# Altium footprint library FootPrintLib_8.PcbLib: 590 footprints (part 20 of 37)
Each footprint in its own frame and in the unit in brackets; x right, y up, seen from the top. Pads: shape width x height; smd on the part's side, far side on the other; paste and mask are expansions set on the pad; w line width, h text height; cw(c..) or ccw(c..) is an arc to the next point about the centre after c.
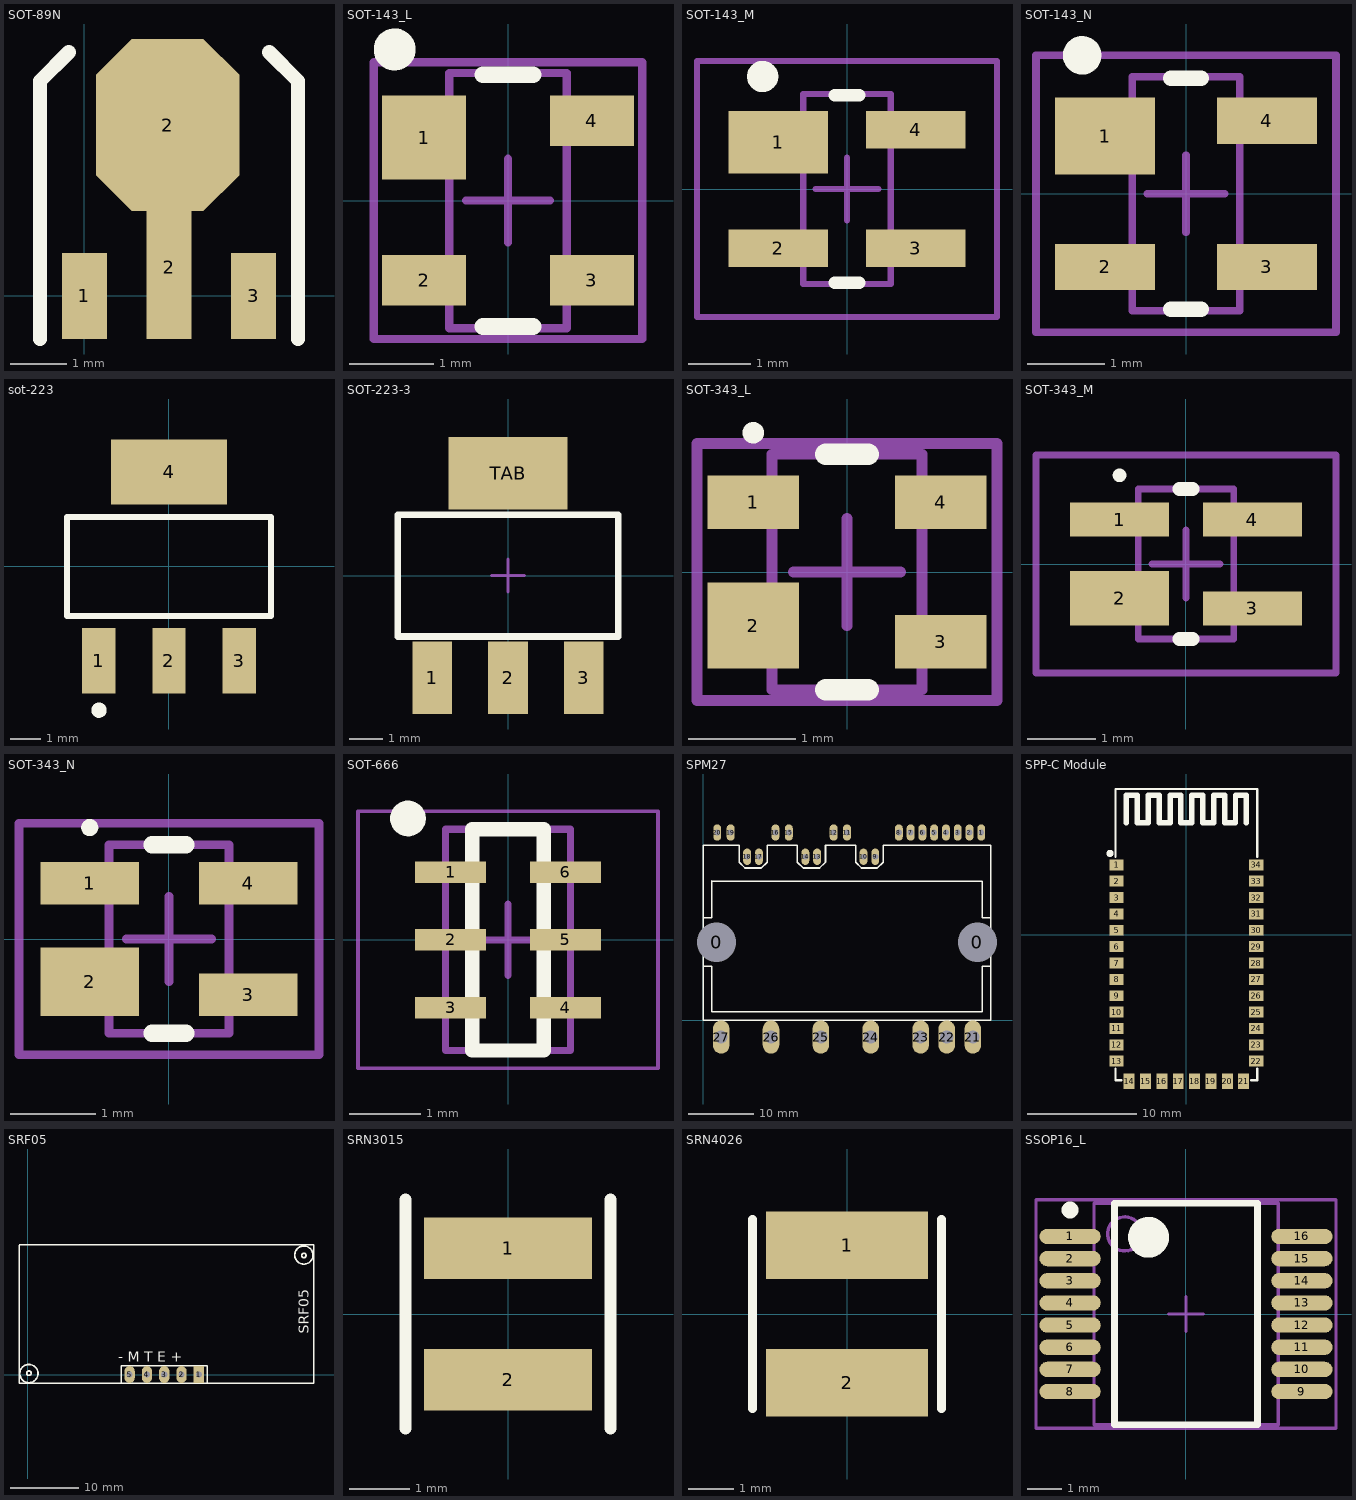
[diagram p19: the footprints below, top view; thin cyan lines are the x and y axes]

## SOT-89N [mm]
pads (4):
  rect 0.8x1.524 smd: 1(0,0) 3(3,0)
  oct 2.54x3.048 smd: 2(1.476,3.029)
  rect 0.8x2.54 smd: 2(1.5,0.508)
Top Overlay:
  lines w0.254: -0.786,-0.762 -0.786,3.81 -0.278,4.318 ; 3.278,4.318 3.786,3.81 3.786,-0.762

## SOT-143_L [mm] "SOT143, 4-Leads, Body 2.9x1.3mm, Pitch 1.9mm, Lead Span 2.5mm, IPC High Density"
height 1.1
pads (4):
  rect 1x1 smd: 1(-1,0.75)
  rect 1x0.6 smd: 2(-1,-0.95) 3(1,-0.95) 4(1,0.95)
Top Overlay:
  circle w0.25: c-1.35,1.8 r0.125
  lines w0.2: -0.3,-1.5 0.3,-1.5 ; -0.3,1.5 0.3,1.5
Mechanical 13:
  lines w0.1: -0.7,-1.52 0.7,-1.52 0.7,1.52 -0.7,1.52 -0.7,-1.52
Mechanical 15:
  lines w0.1: -0.5,0 0.5,0 ; 0,-0.5 0,0.5 ; -1.6,-1.65 1.6,-1.65 1.6,1.65 -1.6,1.65 -1.6,-1.65
3D body: height 1.1, standoff 0, extent -0.7,-1.52 0.7,1.52

## SOT-143_M [mm] "SOT143, 4-Leads, Body 2.9x1.3mm, Pitch 1.9mm, Lead Span 2.5mm, IPC Low Density"
height 1.1
pads (4):
  rect 1.6x1 smd: 1(-1.1,0.75)
  rect 1.6x0.6 smd: 2(-1.1,-0.95) 3(1.1,-0.95) 4(1.1,0.95)
Top Overlay:
  circle w0.25: c-1.35,1.8 r0.125
  lines w0.2: -0.2,-1.5 0.2,-1.5 ; -0.2,1.5 0.2,1.5
Mechanical 13:
  lines w0.1: -0.7,-1.52 -0.7,1.52 0.7,1.52 0.7,-1.52 -0.7,-1.52
Mechanical 15:
  lines w0.1: -0.5,0 0.5,0 ; 0,-0.5 0,0.5 ; -2.4,-2.05 -2.4,2.05 2.4,2.05 2.4,-2.05 -2.4,-2.05
3D body: height 1.1, standoff 0, extent -0.7,-1.52 0.7,1.52

## SOT-143_N [mm] "SOT143, 4-Leads, Body 2.9x1.3mm, Pitch 1.9mm, Lead Span 2.5mm, IPC Medium Density"
height 1.1
pads (4):
  rect 1.3x1 smd: 1(-1.05,0.75)
  rect 1.3x0.6 smd: 2(-1.05,-0.95) 3(1.05,-0.95) 4(1.05,0.95)
Top Overlay:
  circle w0.25: c-1.35,1.8 r0.125
  lines w0.2: -0.2,-1.5 0.2,-1.5 ; -0.2,1.5 0.2,1.5
Mechanical 13:
  lines w0.1: -0.7,-1.52 -0.7,1.52 0.7,1.52 0.7,-1.52 -0.7,-1.52
Mechanical 15:
  lines w0.1: -0.5,0 0.5,0 ; 0,-0.5 0,0.5 ; -1.95,-1.8 -1.95,1.8 1.95,1.8 1.95,-1.8 -1.95,-1.8
3D body: height 1.1, standoff 0, extent -0.7,-1.52 0.7,1.52

## sot-223 [mm] "SOT-223/SC-73; 4 Leads; Body 6.7 x 7.3 mm, inc. leads (LxW max)"
height 1.8
pads (4):
  rect 1.1x2.15 smd: 1(-2.3,-3.1) 2(0,-3.1) 3(2.3,-3.1)
  rect 3.81x2.15 smd: 4(0,3.1)
Top Overlay:
  circle w0.25: c-2.3,-4.725 r0.125
  lines w0.2: -3.35,-1.625 3.35,-1.625 3.35,1.625 -3.35,1.625 -3.35,-1.625

## SOT-223-3 [mm]
height 1.8
pads (4):
  rect 1.2x2.2 smd: 1(-2.3,-3.1) 2(0,-3.1) 3(2.3,-3.1)
  rect 3.6x2.2 smd: TAB(0,3.1)
Top Overlay:
  lines w0.2: -3.35,-1.85 -3.35,1.85 3.35,1.85 3.35,-1.85 -3.35,-1.85
Mechanical 15:
  lines w0.1: -0.5,0 0.5,0 ; 0,-0.5 0,0.5
3D body "User Library-AMS1117.step": height 1.85, standoff -0.01, extent -3.25,-3.443 3.25,3.556

## SOT-343_L [mm] "SOT343, 4-Leads, Body 2x1.3 mm, Pitch 1.3mm, Lead Span 2.1mm, IPC High Density"
height 1
pads (4):
  rect 0.85x0.5 smd: 1(-0.875,0.65) 3(0.875,-0.65) 4(0.875,0.65)
  rect 0.85x0.8 smd: 2(-0.875,-0.5)
Top Overlay:
  circle w0.1: c-0.875,1.3 r0.05
  lines w0.2: -0.2,-1.1 0.2,-1.1 ; -0.2,1.1 0.2,1.1
Mechanical 13:
  lines w0.1: -0.7,-1.1 -0.7,1.1 0.7,1.1 0.7,-1.1 -0.7,-1.1
Mechanical 15:
  lines w0.1: -0.5,0 0.5,0 ; 0,-0.5 0,0.5 ; -1.4,-1.2 -1.4,1.2 1.4,1.2 1.4,-1.2 -1.4,-1.2
3D body: height 1, standoff 0, extent -0.7,-1.1 0.7,1.1

## SOT-343_M [mm] "SOT343, 4-Leads, Body 2x1.3 mm, Pitch 1.3mm, Lead Span 2.1mm, IPC Low Density"
height 1
pads (4):
  rect 1.45x0.5 smd: 1(-0.975,0.65) 3(0.975,-0.65) 4(0.975,0.65)
  rect 1.45x0.8 smd: 2(-0.975,-0.5)
Top Overlay:
  circle w0.1: c-0.975,1.3 r0.05
  lines w0.2: -0.1,-1.1 0.1,-1.1 ; -0.1,1.1 0.1,1.1
Mechanical 13:
  lines w0.1: -0.7,-1.1 0.7,-1.1 0.7,1.1 -0.7,1.1 -0.7,-1.1
Mechanical 15:
  lines w0.1: -0.5,0 0.5,0 ; 0,-0.5 0,0.5 ; -2.2,-1.6 2.2,-1.6 2.2,1.6 -2.2,1.6 -2.2,-1.6
3D body: height 1, standoff 0, extent -0.7,-1.1 0.7,1.1

## SOT-343_N [mm] "SOT343, 4-Leads, Body 2x1.3 mm, Pitch 1.3mm, Lead Span 2.1mm, IPC Medium Density"
height 1
pads (4):
  rect 1.15x0.5 smd: 1(-0.925,0.65) 3(0.925,-0.65) 4(0.925,0.65)
  rect 1.15x0.8 smd: 2(-0.925,-0.5)
Top Overlay:
  circle w0.1: c-0.925,1.3 r0.05
  lines w0.2: -0.2,-1.1 0.2,-1.1 ; -0.2,1.1 0.2,1.1
Mechanical 13:
  lines w0.1: -0.7,-1.1 0.7,-1.1 0.7,1.1 -0.7,1.1 -0.7,-1.1
Mechanical 15:
  lines w0.1: -0.5,0 0.5,0 ; 0,-0.5 0,0.5 ; -1.75,-1.35 1.75,-1.35 1.75,1.35 -1.75,1.35 -1.75,-1.35
3D body: height 1, standoff 0, extent -0.7,-1.1 0.7,1.1

## SOT-666 [mm] "ECOPACK"
height 0.6
pads (6):
  rect 1x0.3 smd: 1(-0.805,0.95) 2(-0.805,0) 3(-0.805,-0.95) 4(0.805,-0.95) 5(0.805,0) 6(0.805,0.95)
Top Overlay:
  circle w0.25: c-1.4,1.7 r0.125
  lines w0.2: -0.5,-1.55 0.5,-1.55 0.5,1.55 -0.5,1.55 -0.5,-1.55
Mechanical 13:
  lines w0.1: -0.875,-1.55 -0.875,1.55 0.875,1.55 0.875,-1.55 -0.875,-1.55
Mechanical 15:
  lines w0.05: -2.1,-1.8 -2.1,1.8 2.1,1.8 2.1,-1.8 -2.1,-1.8
  lines w0.1: -0.5,0 0.5,0 ; 0,-0.5 0,0.5
3D body "User Library-SOT23-6.STEP": height 1.3, standoff 0, extent -1.5,-1.5 1.5,1.5

## SPM27 [mm]
pads (29):
  round 5 hole 6: 0(2.032,11.938) 0(41.91,11.938)
  oval 1.2x2.5 hole 0.9: 1(42.5,28.7) 2(40.7,28.7) 3(38.9,28.7) 4(37.1,28.7) 5(35.3,28.7) 6(33.5,28.7) 7(31.7,28.7) 8(29.9,28.7) 9(26.3,25) 10(24.5,25) 11(21.975,28.7) 12(19.925,28.7) 13(17.4,25) 14(15.6,25) 15(13.075,28.7) 16(11.025,28.7) 17(8.5,25) 18(6.7,25) 19(4.175,28.7) 20(2.125,28.7)
  oval 2.54x5.08 hole 2: 21(41.225,-2.575) 22(37.225,-2.575) 23(33.225,-2.575) 24(25.6,-2.575) 25(17.975,-2.575) 26(10.35,-2.575) 27(2.725,-2.575)
Top Overlay:
  lines w0.254: -0.025,8.275 1.275,8.275 1.275,1.275 42.675,1.275 42.675,8.275 43.975,8.275 ; -0.025,15.675 1.275,15.675 1.275,21.275 42.675,21.275 42.675,15.675 43.975,15.675 ; -0.025,-0.025 -0.025,10.275 1.975,10.275 ccw(c1.975,11.975) 1.975,13.675 -0.025,13.675 -0.025,26.775 5.475,26.775 5.475,24.175 6.375,23.275 8.875,23.275 9.775,24.175 9.775,26.775 14.375,26.775 14.375,24.175 15.275,23.275 17.775,23.275 18.675,24.175 18.675,26.775 23.3,26.775 23.3,24.175 24.2,23.275 26.575,23.275 27.5,24.15 27.5,26.775 43.975,26.775 43.975,13.675 41.975,13.675 ccw(c41.975,11.975) 41.975,10.275 43.975,10.275 43.975,-0.025 -0.025,-0.025

## SPP-C Module [mm] "Bluetooth Modules 26/7x13mm"
height 1.6
pads (34):
  rect 1.3x1 smd: 1(-6.4,6.4) 2(-6.4,4.9) 3(-6.4,3.4) 4(-6.4,1.9) 5(-6.4,0.4) 6(-6.4,-1.1) 7(-6.4,-2.6) 8(-6.4,-4.1) 9(-6.4,-5.6) 10(-6.4,-7.1) 11(-6.4,-8.6) 12(-6.4,-10.1) 13(-6.4,-11.6) 22(6.4,-11.6) 23(6.4,-10.1) 24(6.4,-8.6) 25(6.4,-7.1) 26(6.4,-5.6) 27(6.4,-4.1) 28(6.4,-2.6) 29(6.4,-1.1) 30(6.4,0.4) 31(6.4,1.9) 32(6.4,3.4) 33(6.4,4.9) 34(6.4,6.4)
  rect 1x1.4 smd: 14(-5.25,-13.45) 15(-3.75,-13.45) 16(-2.25,-13.45) 17(-0.75,-13.45) 18(0.75,-13.45) 19(2.25,-13.45) 20(3.75,-13.45) 21(5.25,-13.45)
Top Overlay:
  circle w0.4: c-7,7.45 r0.125
  lines w0.2: -6.5,-12.3 -6.5,-13.35 -5.95,-13.35 ; -6.5,7.125 -6.5,13.35 6.5,13.35 6.5,7.125 ; 5.95,-13.35 6.5,-13.35 6.5,-12.3
  lines w0.5: -5.5,10.275 -5.5,12.775 -4.5,12.775 -4.5,10.275 -3.5,10.275 -3.5,12.775 -2.5,12.775 -2.5,10.275 -1.5,10.275 -1.5,12.775 -0.5,12.775 -0.5,10.275 0.5,10.275 0.5,12.775 1.5,12.775 1.5,10.275 2.5,10.275 2.5,12.775 3.5,12.775 3.5,10.275 4.5,10.275 4.5,12.775 5.5,12.775 5.5,10.275
3D body "SPP_V2.step": height 1.85, standoff -0.01, extent -6.5,-13.35 6.5,13.35

## SRF05 [mm] "Connector; Header; 5 Position"
pads (5):
  rect 1.5x2.5 hole 0.9: 1(25.146,0)
  oval 1.5x2.5 hole 0.9: 2(22.606,0) 3(20.066,0) 4(17.526,0) 5(14.986,0)
Top Overlay:
  lines w0.2: -1.27,19 -1.27,-1.27 42,-1.27 ; -1.27,19.05 42.037,19.05 42.037,-1.27 ; 13.716,-1.27 26.416,-1.27 26.416,1.27 13.716,1.27 13.716,-1.27
  lines w0.254: 0.508,0.127 cw(c0.191,0.199) 0.514,0.237 ; 1.518,0.017 cw(c0.188,0.146) 1.524,0.127 ; 40.888,17.416 cw(c40.571,17.489) 40.894,17.526 ; 41.904,17.416 cw(c40.574,17.545) 41.91,17.526
  text "SRF05" at 41.275,5.969 h1.52
  text "- M T E +" at 13.335,1.905 h1.52

## SRN3015 [mil] "SRN3015 Series - Semi-shielded Power Inductors"
height 98.43
pads (2):
  rect 110x40 smd: 1(0,43) 2(0,-43)
Top Overlay:
  lines w7.87: -66.93,-74.8 -66.93,74.8 ; 66.93,-74.8 66.93,74.8
3D body "User Library-Inductor SRN3015 Series.STEP": height 59.06, standoff 0, extent -53.81,-59 53.45,59.9

## SRN4026 [mm] "SRN4026 Series - Semi-shielded Power Inductors"
height 2.5
pads (2):
  rect 3.6x1.5 smd: 1(0,1.525) 2(0,-1.525)
Top Overlay:
  lines w0.2: -2.1,-2.1 -2.1,2.1 ; 2.1,-2.1 2.1,2.1
3D body "User Library-NRG4026.STEP": height 2.61, standoff 0, extent -2,-2.007 2,1.993

## SSOP16_L [mm] "SOP, 16-Leads, Body 6.2x5.3mm, Pitch 0.65mm, IPC High Density"
height 2
pads (16):
  oval 1.8x0.45 smd: 1(-3.4,2.275) 2(-3.4,1.625) 3(-3.4,0.975) 4(-3.4,0.325) 5(-3.4,-0.325) 6(-3.4,-0.975) 7(-3.4,-1.625) 8(-3.4,-2.275) 9(3.4,-2.275) 10(3.4,-1.625) 11(3.4,-0.975) 12(3.4,-0.325) 13(3.4,0.325) 14(3.4,0.975) 15(3.4,1.625) 16(3.4,2.275)
Top Overlay:
  circle w0.6: c-1.1,2.25 r0.3
  circle w0.25: c-3.4,3.05 r0.125
  lines w0.2: -2.1,-3.25 2.1,-3.25 2.1,3.25 -2.1,3.25 -2.1,-3.25
Mechanical 13:
  circle w0.1: c-1.8,2.35 r0.5
  lines w0.1: -2.7,-3.25 2.7,-3.25 2.7,3.25 -2.7,3.25 -2.7,-3.25
Mechanical 15:
  lines w0.1: -0.5,0 0.5,0 ; 0,-0.5 0,0.5 ; -4.4,-3.35 4.4,-3.35 4.4,3.35 -4.4,3.35 -4.4,-3.35
3D body: height 2, standoff 0, extent -2.7,-3.25 2.7,3.25